# Altium schematic symbol library Ic%.SchLib: 452 symbols (part 12 of 12)
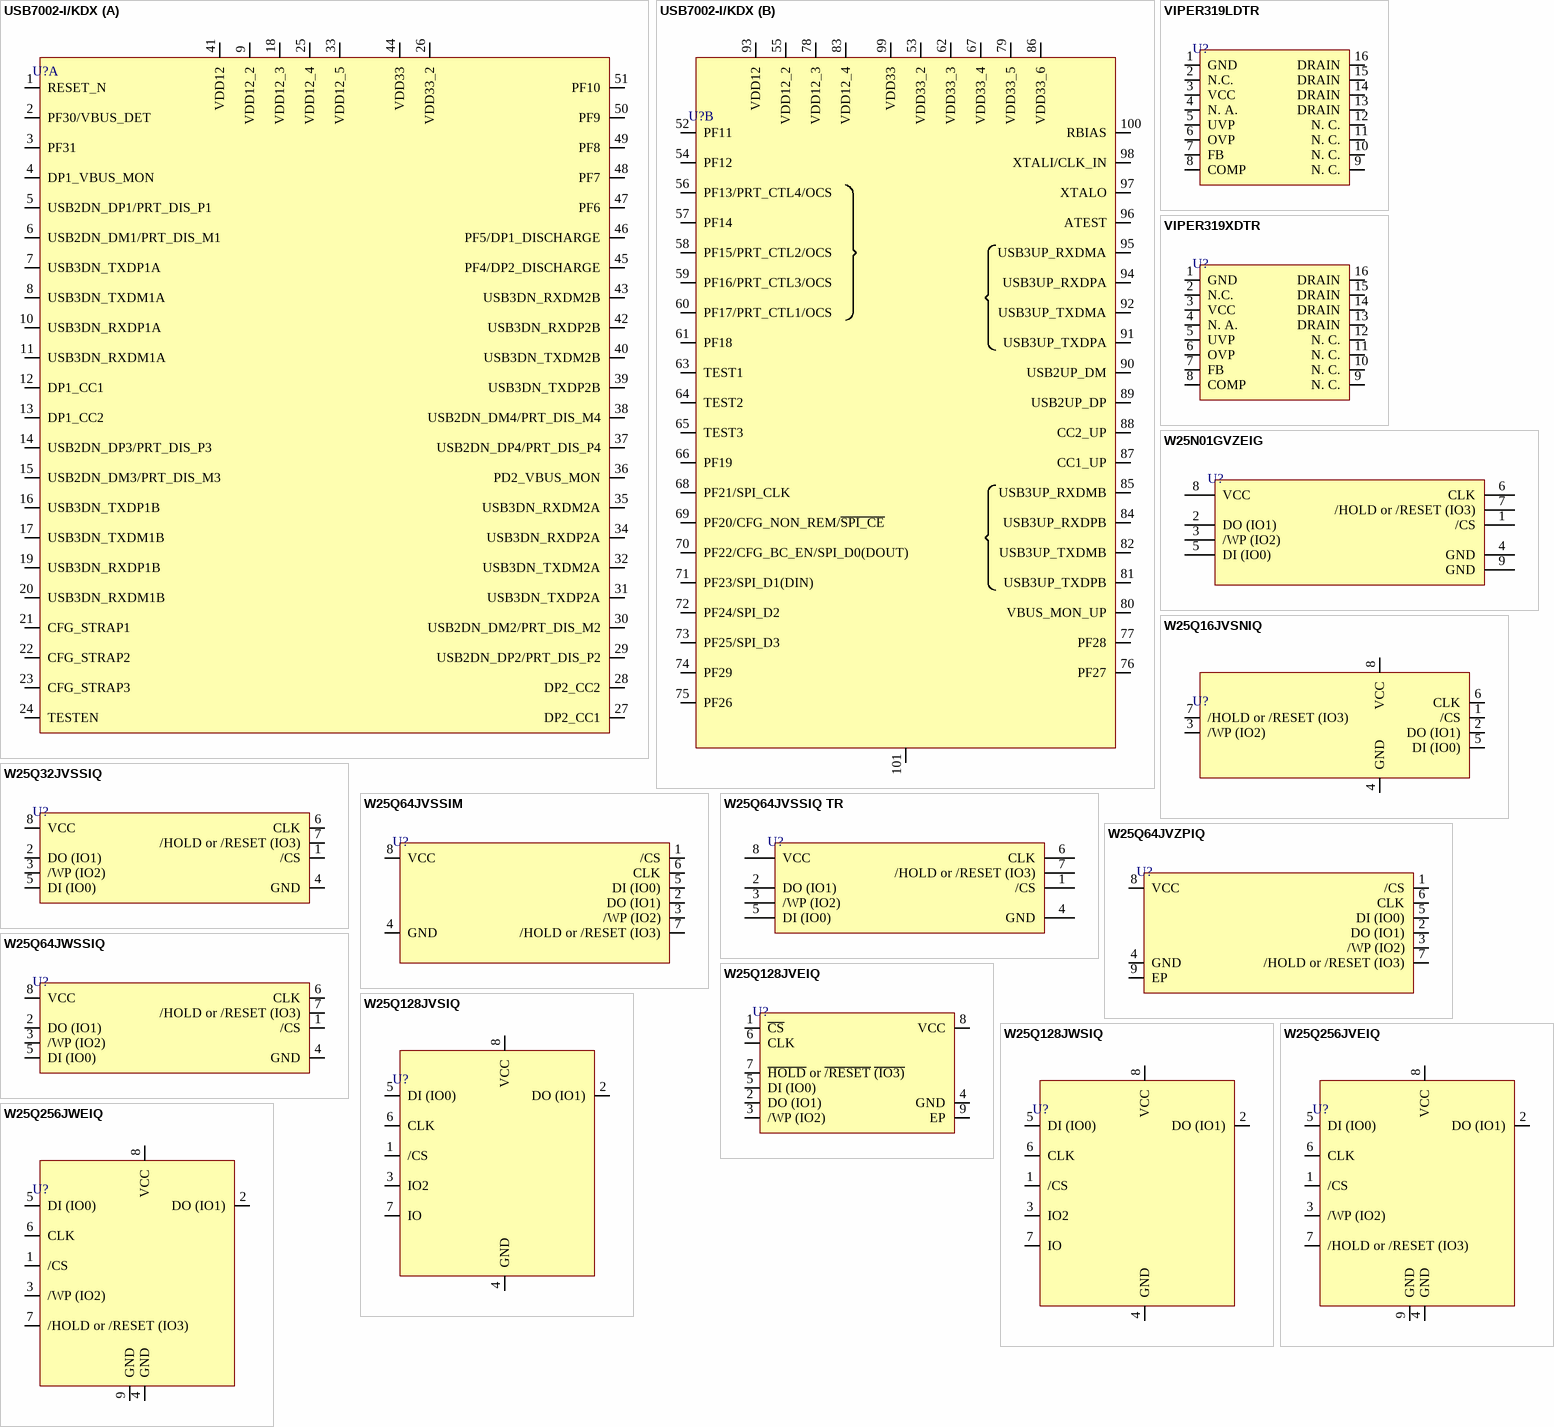
[diagram p34: symbols USB7002-I/KDX to W25Q256JWEIQ]

## W25Q128JVSIQ
designator U?
IC FLASH 128MBIT SPI/QUAD 8SOIC; Manufacturer: Winbond; Manufacturer Part Number: W25Q128JVSIQ; Memory Format: Non-Volatile,FLASH; Frequency: 133MHz; Memory Size: 128Mb; Supplier: Arrow Electronics; Supplier Part Number: W25Q128JVSIQ; RoHS: Yes; Category: Flash; Stock: 3659; Pricing: 1=1.6411, 10=1.4568, 25=1.4422, 50=1.3009, 100=1.2498, 250=1.2373, 500=1.1781, 1000=1.1392, 5000=1.0957 (USD); Mounting Technology: Surface Mount; Case/Package: SOIC; Min Operating Temperature: -40°C; Max Operating Temperature: 85°C; Packaging: Tray; Series: SpiFlash®; RoHS Compliant: Yes; ComponentLink1URL: http://www.winbond.com/resource-files/w25q128jv%20revf%2003272018%20plus.pdf?src-supplier=Digikey; ComponentLink1Description: http://www.winbond.com/resource-files/w25q128jv%20revf%2003272018%20plus.pdf?src-supplier=Digikey; LCSC Part Number: C97521; Item Type: IC
footprint SOIC-8 (208 mil)
pins: 1 /CS, 2 DO (IO1), 3 IO2, 4 GND, 5 DI (IO0), 6 CLK, 7 IO, 8 VCC

## W25Q128JWSIQ
designator U?
IC FLASH 128MBIT SPI/QUAD 8SOIC; Manufacturer: Winbond; Manufacturer Part Number: W25Q128JWSIQ; Supplier: Digikey; Supplier Part Number: 256-W25Q128JWSIQ-ND; RoHS: Yes; Category: RAM; Pricing: 90=1.563 (USD); LCSC Part Number: C2763561; Item Type: IC
footprint SOIC-8 (208 mil)
pins: 1 /CS, 2 DO (IO1), 3 IO2, 4 GND, 5 DI (IO0), 6 CLK, 7 IO, 8 VCC

## W25Q256JVEIQ
designator U?
IC FLASH 256MBIT SPI/QUAD 8WSON; Manufacturer: Winbond; Manufacturer Part Number: W25Q256JVEIQ; Supplier: Digikey; Supplier Part Number: W25Q256JVEIQ-ND; RoHS: Yes; Category: Flash; Stock: 38433; Pricing: 1=3.21, 10=2.908, 25=2.8452, 63=2.82984, 126=2.5373, 252=2.5281, 504=2.43571, 1008=2.31563 (USD); Min Operating Temperature: -40°C; Max Operating Temperature: 85°C; RoHS Compliant: Yes; ComponentLink1URL: http://www.winbond.com/resource-files/w25q256jv%20spi%20revg%2008032017.pdf?src-supplier=Digikey; ComponentLink1Description: http://www.winbond.com/resource-files/w25q256jv%20spi%20revg%2008032017.pdf?src-supplier=Digikey; LCSC Part Number: C97522; Item Type: IC
footprint 8-WSON (8x6)
pins: 1 /CS, 2 DO (IO1), 3 /WP (IO2), 4 GND, 5 DI (IO0), 6 CLK, 7 /HOLD or /RESET (IO3), 8 VCC, 9 GND

## W25Q256JWEIQ
designator U?
IC FLASH 256MBIT SPI/QUAD 8WSON; Manufacturer: Winbond; Manufacturer Part Number: W25Q256JWEIQ; Supplier 1: Arrow Electronics; RoHS: Yes; Category: Memory; RoHS Compliant: Yes; Supplier Part Number 1: W25Q256JWEIQ; ComponentLink1Description: LCSC; ComponentLink1URL: https://www.lcsc.com/product-detail/NOR-FLASH_Winbond-Elec-W25Q256JWEIQ_C2980994.html; LCSC Part Number: C2980994; Item Type: IC
footprint 8-WSON (8x6)
pins: 1 /CS, 2 DO (IO1), 3 /WP (IO2), 4 GND, 5 DI (IO0), 6 CLK, 7 /HOLD or /RESET (IO3), 8 VCC, 9 GND

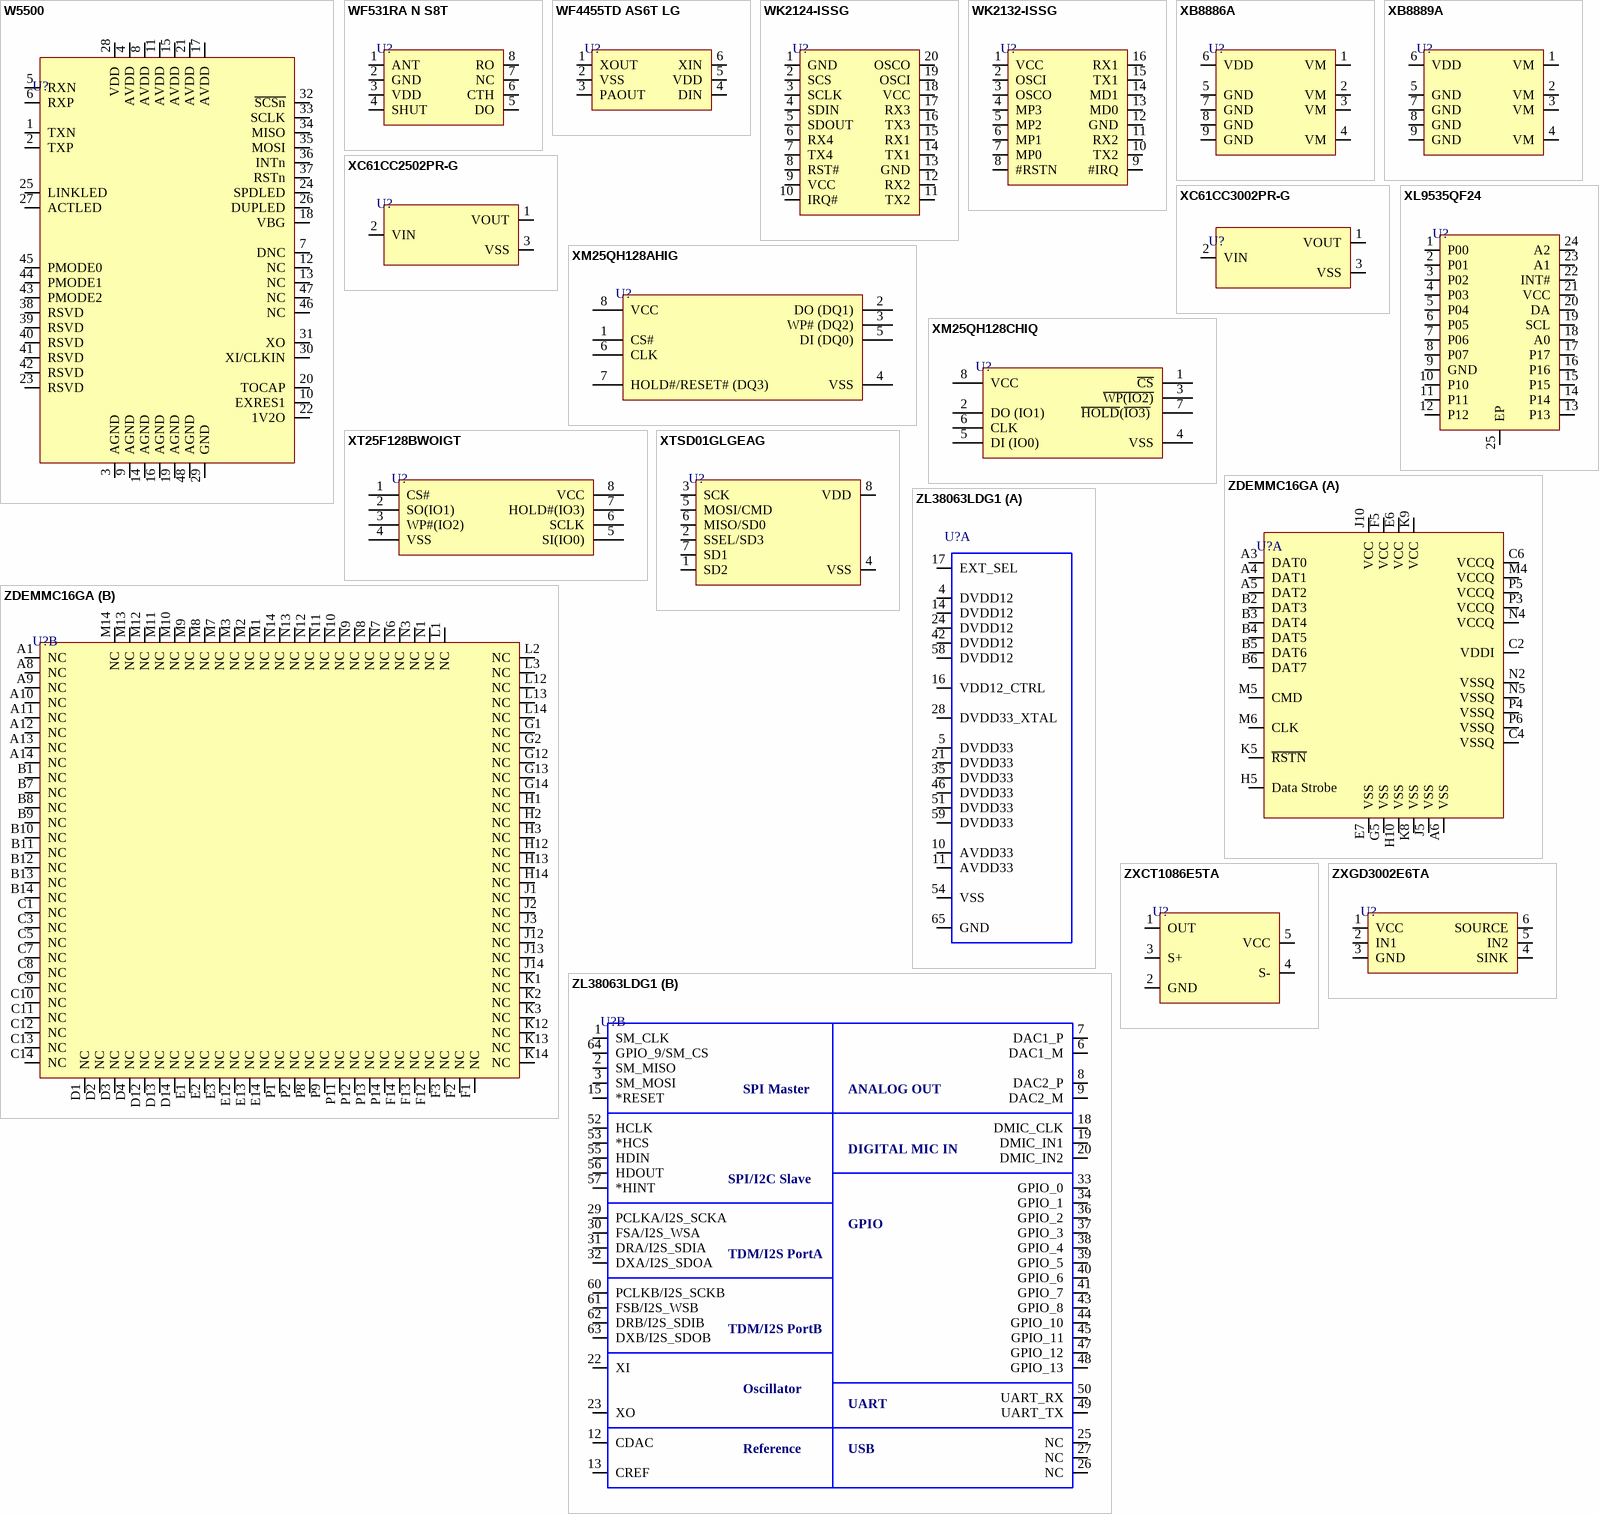
[diagram p23: symbols W5500 to ZXGD3002E6TA]

## W5500
designator U?
SPI LQFP-48(7x7) Ethernet ICs ROHS; Manufacturer: WIZNET; Manufacturer Part Number: W5500; Item Type: IC; LCSC Part Number: C32843; Package: LQFP-48(7x7); ComponentLink1Description: LCSC; ComponentLink1URL: https://www.lcsc.com/product-detail/Ethernet-ICs_WIZNET-W5500_C32843.html
footprint 48-LQFP (7x7)_
pins: 1 TXN, 2 TXP, 3 AGND, 4 AVDD, 5 RXN, 6 RXP, 7 DNC, 8 AVDD, 9 AGND, 10 EXRES1, 11 AVDD, 12 NC, 13 NC, 14 AGND, 15 AVDD, 16 AGND, 17 AVDD, 18 VBG, 19 AGND, 20 TOCAP, 21 AVDD, 22 1V2O, 23 RSVD, 24 SPDLED, 25 LINKLED, 26 DUPLED, 27 ACTLED, 28 VDD, 29 GND, 30 XI/CLKIN, 31 XO, 32 ~{SCSn}, 33 SCLK, 34 MISO, 35 MOSI, 36 INTn, 37 RSTn, 38 RSVD, 39 RSVD, 40 RSVD, 41 RSVD, 42 RSVD, 43 PMODE2, 44 PMODE1, 45 PMODE0, 46 NC, 47 NC, 48 AGND

## WF531RA N S8T
designator U?
SOP-8 RF Transceiver ICs ROHS; Manufacturer: WF; Manufacturer Part Number: WF531RA N S8T; Item type: IC; Package: SOP-8; LCSC Part Number: C2886629
footprint SOP-8
pins: 1 ANT, 2 GND, 3 VDD, 4 SHUT, 5 DO, 6 CTH, 7 NC, 8 RO

## WF4455TD AS6T LG
designator U?
SOT-23-6 RF Transceiver ICs ROHS; Manufacturer: WF; Manufacturer Part Number: WF4455TD AS6T LG; Item Type: IC; Package: SOT-23-6; LCSC Part Number: C2886627; ComponentLink1Description: LCSC; ComponentLink1URL: https://www.lcsc.com/product-detail/RF-Transceiver-ICs_WF-WF4455TD-AS6T-LG_C2886627.html
footprint SOT-23-6
pins: 1 XOUT, 2 VSS, 3 PAOUT, 4 DIN, 5 VDD, 6 XIN

## WK2124-ISSG
designator U?
WK2124 SPI Bus Interface Wide Operating Voltage 4-Channel 256-Level FIFO High-Speed UART; Manufacturer: WEIKAI; Manufacturer Part Number: WK2124-ISSG; Item Type: IC; Package: SSOP-20-208mil; LCSC Part Number: C86332; ComponentLink1Description: LCSC; ComponentLink1URL: https://www.lcsc.com/product-detail/Interface-Specialized_WEIKAI-WK2124-ISSG_C86332.html?s_z=n_wk2124
footprint SSOP-20-208mil
pins: 1 GND, 2 SCS, 3 SCLK, 4 SDIN, 5 SDOUT, 6 RX4, 7 TX4, 8 RST#, 9 VCC, 10 IRQ#, 11 TX2, 12 RX2, 13 GND, 14 TX1, 15 RX1, 16 TX3, 17 RX3, 18 VCC, 19 OSCI, 20 OSCO

## WK2132-ISSG
designator U?
SSOP-16-208mil Interface - Specialized ROHS; Manufacturer: WEIKAI; Manufacturer Part Number: WK2132-ISSG; Item Type: IC; Package: SSOP-16-208mil; LCSC Part Number: C401039; ComponentLink1Description: LCSC; ComponentLink1URL: https://www.lcsc.com/product-detail/Interface-Specialized_WEIKAI-WK2132-ISSG_C401039.html
footprint SSOP-16-208mil
pins: 1 VCC, 2 OSCI, 3 OSCO, 4 MP3, 5 MP2, 6 MP1, 7 MP0, 8 #RSTN, 9 #IRQ, 10 TX2, 11 RX2, 12 GND, 13 MD0, 14 MD1, 15 TX1, 16 RX1

## XB8886A
designator U?
SOIC-8-EP Battery Management ICs ROHS; Manufacturer: XySemi; Manufacturer Part Number: XB8886A; Item Type: IC; Package: SOIC-8-EP; LCSC Part Number: C669690; ComponentLink1Description: LCSC; ComponentLink1URL: https://www.lcsc.com/product-detail/Battery-Management-ICs_XySemi-XB8886A_C669690.html
footprint 8-SO-EP_
pins: 1 VM, 2 VM, 3 VM, 4 VM, 5 GND, 6 VDD, 7 GND, 8 GND, 9 GND

## XB8889A
designator U?
One Cell Lithium-ion/Polymer Battery Protection IC; Manufacturer: Xysemi; Manufacturer Part Number: XB8889A; Package: SOP 8-EPAD
footprint 8-SO-EP_
pins: 1 VM, 2 VM, 3 VM, 4 VM, 5 GND, 6 VDD, 7 GND, 8 GND, 9 GND

## XC61CC2502PR-G
designator U?
Supervisory Circuits; Manufacturer: Torex; Manufacturer Part Number: XC61CC2502PR-G; Item Type: IC; Package: SOT-89; LCSC Part Number: -; ComponentLink1Description: Torex; ComponentLink1URL: https://direct.torexsemi.com/en-us/product/xc61c/xc61cc2502pr-g
footprint SOT-89-3
pins: 1 VOUT, 2 VIN, 3 VSS

## XC61CC3002PR-G
designator U?
Supervisory Circuits; Manufacturer: Torex; Manufacturer Part Number: XC61CC3002PR-G; Item Type: IC; Package: SOT-89; LCSC Part Number: -; ComponentLink1Description: Torex; ComponentLink1URL: https://direct.torexsemi.com/en-us/product/xc61c/xc61cc3002pr-g
footprint SOT-89-3
pins: 1 VOUT, 2 VIN, 3 VSS

## XL9535QF24
designator U?
16-bit I²C-bus and SMBus I/O port Expander With Interrupt Output and Configuration Registers; Manufacturer: XINLUDA; Manufacturer Part Number: XL9535QF24; Item Type: IC; Package: QFN-24(4x4); LCSC Part Number: C5444301; ComponentLink1Description: LCSC; ComponentLink1URL: https://lcsc.com/product-detail/I-O-Expanders_XINLUDA-XL9535QF24_C5444301.html?s_z=n_XINLUDA%2520XL9535
footprint QFN-24(4x4)
pins: 1 P00, 2 P01, 3 P02, 4 P03, 5 P04, 6 P05, 7 P06, 8 P07, 9 GND, 10 P10, 11 P11, 12 P12, 13 P13, 14 P14, 15 P15, 16 P16, 17 P17, 18 A0, 19 SCL, 20 DA, 21 VCC, 22 INT#, 23 A1, 24 A2, 25 EP

## XM25QH128AHIG
designator U?
20年 2.7V~3.6V -40℃~+85℃ 20uA 15mA 9mA 14mA 128Mbit SPI 0.5ms 104MHz 300ms SOP-8L NOR FLASH ROHS; Manufacturer: XMC; Manufacturer Part Number: XM25QH128AHIG; Item Type: IC; ComponentLink1Description: LCSC; ComponentLink1URL: https://lcsc.com/product-detail/NOR-FLASH_XMC-XM25QH128AHIG_C328463.html; Footprint: SOP-8L; LCSC Part Number: C328463
footprint SOP-8 (208 Mil)
pins: 1 CS#, 2 DO (DQ1), 3 WP# (DQ2), 4 VSS, 5 DI (DQ0), 6 CLK, 7 HOLD#/RESET# (DQ3) , 8 VCC

## XM25QH128CHIQ
designator U?
3V 128M-BIT SERIAL FLASH MEMORY WITH DUAL/QUAD SPI & QPI; Manufacturer: XMC; Manufacturer Part Number: XM25QH128C; Item Type: IC; Footprint: SOP-8L; ComponentLink1Description: XMC; ComponentLink1URL: https://www.xmcwh.com/en/site/product_con/202
footprint SOP-8 (208 Mil)
pins: 1 ~{CS}, 2 DO (IO1), 3 ~{WP(IO2)}, 4 VSS, 5 DI (IO0), 6 CLK, 7 ~{HOLD}(~{IO3)} , 8 VCC

## XT25F128BWOIGT
designator U?
WSON-8(6x5) NOR FLASH ROHS; Manufacturer: XTX; Manufacturer Part Number: XT25F128BWOIGT; Item Type: IC; Package: WSON-8(6x5); LCSC Part Number: C558846; ComponentLink1Description: LCSC; ComponentLink1URL: https://www.lcsc.com/product-detail/NOR-FLASH_XTX-XT25F128BWOIGT_C558846.html
footprint WSON-8(6x5)
pins: 1 CS#, 2 SO(IO1), 3 WP#(IO2), 4 VSS, 5 SI(IO0), 6 SCLK, 7 HOLD#(IO3), 8 VCC

## XTSD01GLGEAG
designator U?
2.7V~3.6V 50MHz 1Gbit LGA-8(6x8) NAND FLASH ROHS; Manufacturer: XTX; Manufacturer Part Number: XTSD01GLGEAG; Package: LGA-8(6x8); LCSC Part Number: C558837; Item Type: Item Type; ComponentLink1Description: LCSC; ComponentLink1URL: https://www.lcsc.com/product-detail/NAND-FLASH_XTX-XTSD01GLGEAG_C558837.html
footprint XTSD01GLGEAG
pins: 1 SD2, 2 SSEL/SD3, 3 SCK, 4 VSS, 5 MOSI/CMD, 6 MISO/SD0, 7 SD1, 8 VDD

## ZDEMMC16GA
designator U?
16GB 250/90 MB/s eMMC 5.1 FBGA-153 eMMC ROHS; Manufacturer: Zetta; Manufacturer Part Number: ZDEMMC16GA; Item Type: IC; Package: FBGA-153; LCSC Part Number: C7501401; ComponentLink1Description: LCSC; ComponentLink1URL: https://www.lcsc.com/product-detail/eMMC_Zetta-ZDEMMC16GA_C7501401.html
footprint FBGA-153(11.5x13)
part A pins: A3 DAT0, A4 DAT1, A5 DAT2, A6 VSS, B2 DAT3, B3 DAT4, B4 DAT5, B5 DAT6, B6 DAT7, C2 VDDI, C4 VSSQ, C6 VCCQ, E6 VCC, E7 VSS, F5 VCC, G5 VSS, H5 Data Strobe, H10 VSS, J5 VSS, J10 VCC, K5 ~{RSTN}, K8 VSS, K9 VCC, M4 VCCQ, M5 CMD, M6 CLK, N2 VSSQ, N4 VCCQ, N5 VSSQ, P3 VCCQ, P4 VSSQ, P5 VCCQ, P6 VSSQ
part B pins: A1 NC, A8 NC, A9 NC, A10 NC, A11 NC, A12 NC, A13 NC, A14 NC, B1 NC, B7 NC, B8 NC, B9 NC, B10 NC, B11 NC, B12 NC, B13 NC, B14 NC, C1 NC, C3 NC, C5 NC, C7 NC, C8 NC, C9 NC, C10 NC, C11 NC, C12 NC, C13 NC, C14 NC, D1 NC, D2 NC, D3 NC, D4 NC, D12 NC, D13 NC, D14 NC, E1 NC, E2 NC, E3 NC, E12 NC, E13 NC, E14 NC, F1 NC, F2 NC, F3 NC, F12 NC, F13 NC, F14 NC, G1 NC, G2 NC, G12 NC, G13 NC, G14 NC, H1 NC, H2 NC, H3 NC, H12 NC, H13 NC, H14 NC, J1 NC, J2 NC, J3 NC, J12 NC, J13 NC, J14 NC, K1 NC, K2 NC, K3 NC, K12 NC, K13 NC, K14 NC, L1 NC, L2 NC, L3 NC, L12 NC, L13 NC, L14 NC, M1 NC, M2 NC, M3 NC, M7 NC, M8 NC, M9 NC, M10 NC, M11 NC, M12 NC, M13 NC, M14 NC, N1 NC, N3 NC, N6 NC, N7 NC, N8 NC, N9 NC, N10 NC, N11 NC, N12 NC, N13 NC, N14 NC, P1 NC, P2 NC, P8 NC, P9 NC, P11 NC, P12 NC, P13 NC, P14 NC

## ZL38063LDG1
designator U?
IC AUDIO SIGNAL PROCESSOR 64QFN; Manufacturer: Microchip; Manufacturer Part Number: ZL38063LDG1; Supplier: Digi-Key; Supplier Part Number: ZL38063LDG1-ND; RoHS: Yes; Category: Integrated Circuits (ICs); Stock: 1300; Pricing: 1=8.2, 25=7.55, 100=7.175 (USD); ComponentLink1URL: https://www.microsemi.com/document-portal/doc_download/136798-zl38063-datasheet?src-supplier=Digi-Key; ComponentLink1Description: https://www.microsemi.com/document-portal/doc_download/136798-zl38063-datasheet?src-supplier=Digi-Key; LCSC Part Number: C1535597; Item Type: IC
footprint QFN-64-EP(9x9)
part A pins: 4 DVDD12, 5 DVDD33, 10 AVDD33, 11 AVDD33, 14 DVDD12, 16 VDD12_CTRL, 17 EXT_SEL, 21 DVDD33, 24 DVDD12, 28 DVDD33_XTAL, 35 DVDD33, 42 DVDD12, 46 DVDD33, 51 DVDD33, 54 VSS, 58 DVDD12, 59 DVDD33, 65 GND
part B pins: 1 SM_CLK, 2 SM_MISO, 3 SM_MOSI, 6 DAC1_M, 7 DAC1_P, 8 DAC2_P, 9 DAC2_M, 12 CDAC, 13 CREF, 15 *RESET, 18 DMIC_CLK, 19 DMIC_IN1, 20 DMIC_IN2, 22 XI, 23 XO, 25 NC, 26 NC, 27 NC, 29 PCLKA/I2S_SCKA, 30 FSA/I2S_WSA, 31 DRA/I2S_SDIA, 32 DXA/I2S_SDOA, 33 GPIO_0, 34 GPIO_1, 36 GPIO_2, 37 GPIO_3, 38 GPIO_4, 39 GPIO_5, 40 GPIO_6, 41 GPIO_7, 43 GPIO_8, 44 GPIO_10, 45 GPIO_11, 47 GPIO_12, 48 GPIO_13, 49 UART_TX, 50 UART_RX, 52 HCLK, 53 *HCS, 55 HDIN, 56 HDOUT, 57 *HINT, 60 PCLKB/I2S_SCKB, 61 FSB/I2S_WSB, 62 DRB/I2S_SDIB, 63 DXB/I2S_SDOB, 64 GPIO_9/SM_CS
part B text: SPI Master; ANALOG OUT; DIGITAL MIC IN; SPI/I2C Slave; GPIO; TDM/I2S PortA; TDM/I2S PortB; Oscillator; UART; Reference; USB

## ZXCT1086E5TA
designator U?
IC CURRENT MONITOR SOT25; Manufacturer: Diodes; Manufacturer Part Number: ZXCT1086E5TA; Supplier: Future Electronics; LCSC Part Number: C154866; RoHS: Yes; Item Type: IC; Stock: 9000; Pricing: 3000=0.69, 6000=0.665 (USD); ComponentLink1URL: https://datasheet.ciiva.com/1484/1383709-1484867.pdf?src-supplier=Element14; ComponentLink1Description: https://datasheet.ciiva.com/1484/1383709-1484867.pdf?src-supplier=Element14
footprint SOT-23-5
pins: 1 OUT, 2 GND, 3 S+, 4 S-, 5 VCC

## ZXGD3002E6TA
designator U?
IC GATE DRVR IGBT/MOSFET SOT23-6; Manufacturer: Diodes Zetex; Manufacturer Part Number: ZXGD3002E6TA; Supplier: Future Electronics; LCSC Part Number: C156276; RoHS: No; Item Type: IC; Stock: 48000; Pricing: 3000=0.275, 6000=0.265 (USD); ComponentLink1URL: https://datasheet.ciiva.com/1949/zxgd3002e6-1949760.pdf?src-supplier=Avnet; ComponentLink1Description: https://datasheet.ciiva.com/1949/zxgd3002e6-1949760.pdf?src-supplier=Avnet; ComponentLink2URL: https://datasheet.ciiva.com/1949/zxgd3002e6-1949760.pdf?src-supplier=Digikey; ComponentLink2Description: https://datasheet.ciiva.com/1949/zxgd3002e6-1949760.pdf?src-supplier=Digikey; ComponentLink3URL: https://datasheet.ciiva.com/16957/0900766b80e4f81f-16957288.pdf?src-supplier=Allied+Electronics; ComponentLink3Description: https://datasheet.ciiva.com/16957/0900766b80e4f81f-16957288.pdf?src-supplier=Allied+Electronics; ComponentLink4URL: https://datasheet.ciiva.com/6807/28818-6807237.pdf?src-supplier=Newark; ComponentLink4Description: https://datasheet.ciiva.com/6807/28818-6807237.pdf?src-supplier=Newark; ComponentLink5URL: https://datasheet.ciiva.com/7652/28818-7652871.pdf?src-supplier=Element14; ComponentLink5Description: https://datasheet.ciiva.com/7652/28818-7652871.pdf?src-supplier=Element14; ComponentLink6URL: https://datasheet.ciiva.com/3226/zxgd3002e6-3226748.pdf?src-supplier=Avnet; ComponentLink6Description: https://datasheet.ciiva.com/3226/zxgd3002e6-3226748.pdf?src-supplier=Avnet; ComponentLink7URL: https://datasheet.ciiva.com/1949/zxgd3002e6-1949761.pdf?src-supplier=Digikey; ComponentLink7Description: https://datasheet.ciiva.com/1949/zxgd3002e6-1949761.pdf?src-supplier=Digikey; ComponentLink8URL: https://datasheet.ciiva.com/1949/zxgd3002e6-1949762.pdf?src-supplier=Digikey; ComponentLink8Description: https://datasheet.ciiva.com/1949/zxgd3002e6-1949762.pdf?src-supplier=Digikey
footprint SOT-23-6
pins: 1 VCC, 2 IN1, 3 GND, 4 SINK, 5 IN2, 6 SOURCE